# Altium footprint library LimeMicroAltiumLib.PcbLib: 876 footprints (part 22 of 57)
Each footprint in its own frame and in the unit in brackets; x right, y up, seen from the top. Pads: shape width x height; smd on the part's side, far side on the other; paste and mask are expansions set on the pad; w line width, h text height; cw(c..) or ccw(c..) is an arc to the next point about the centre after c.
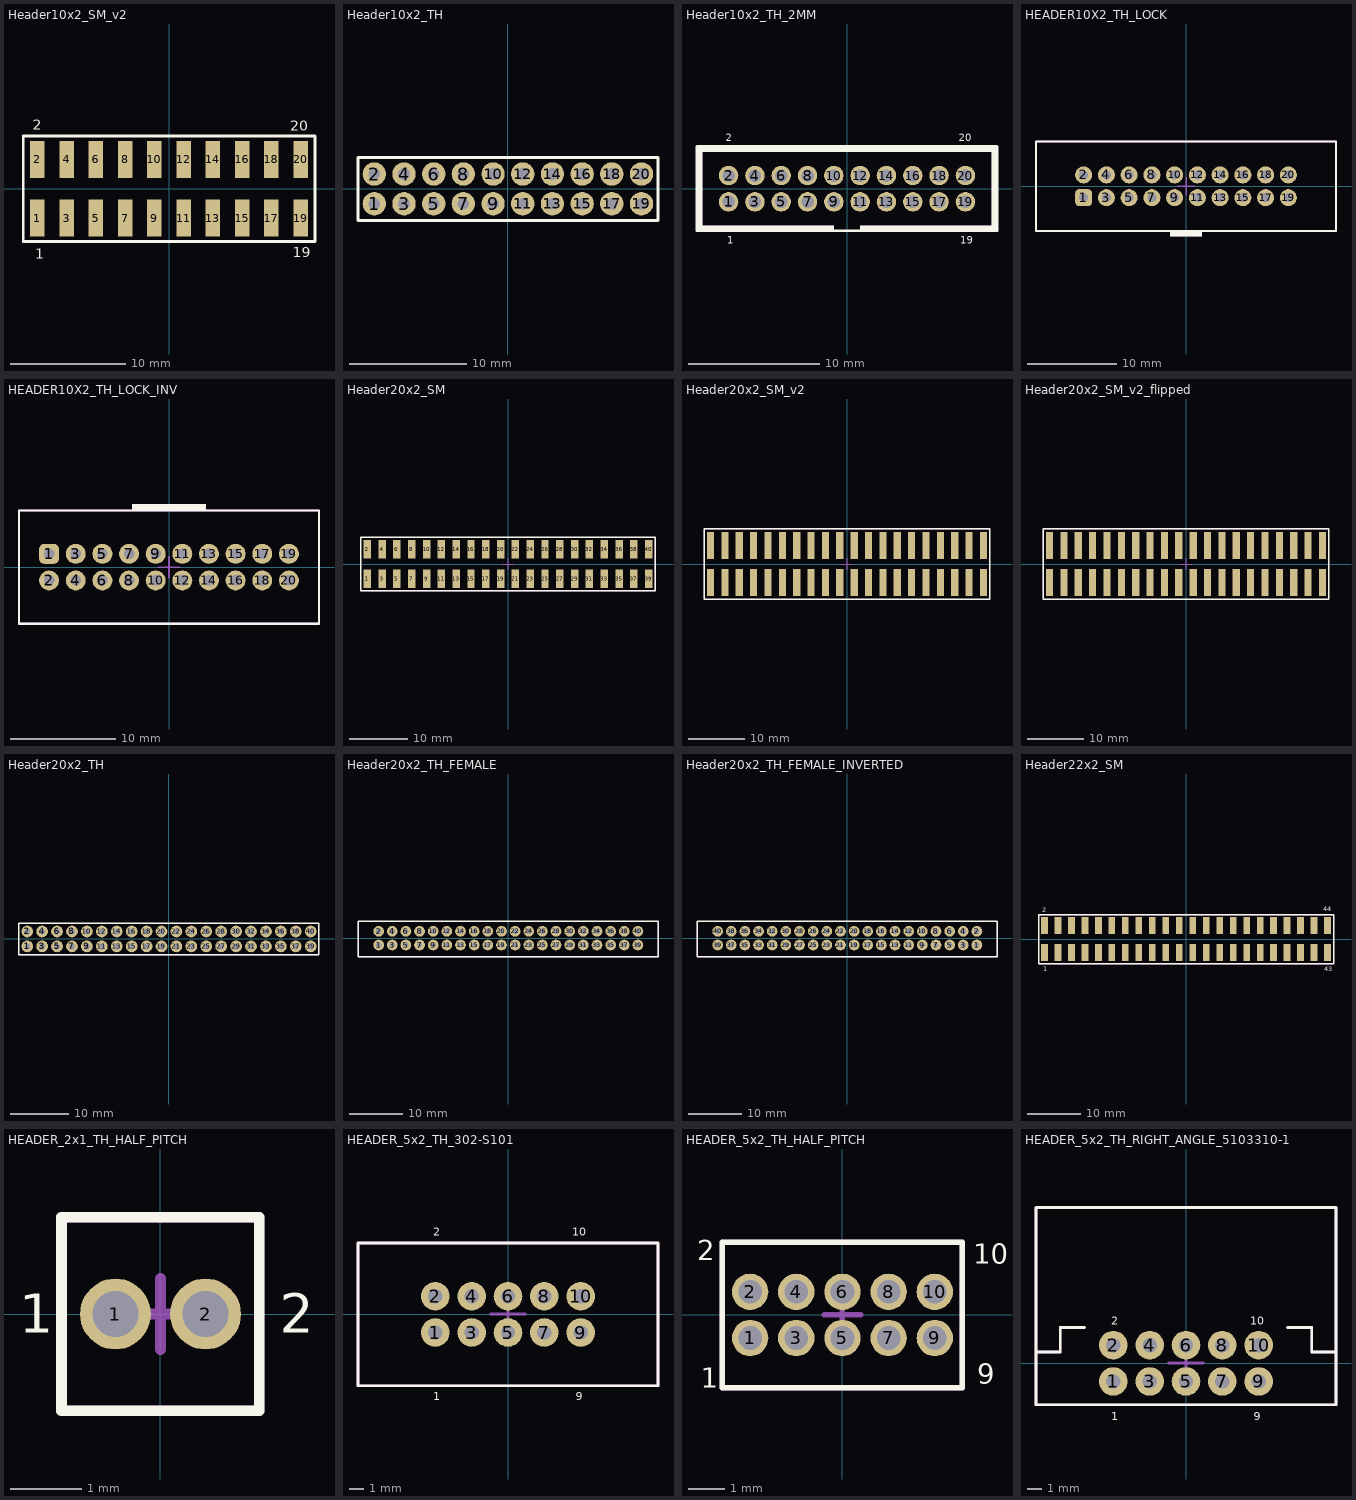
[diagram p21: the footprints below, top view; thin cyan lines are the x and y axes]

## Header10x2_SM_v2 [mm]
pads (20):
  rect 1.27x3.2 smd: 1(-11.443,-2.55) 2(-11.443,2.55) 3(-8.9,-2.55) 4(-8.9,2.55) 5(-6.357,-2.55) 6(-6.357,2.55) 7(-3.814,-2.55) 8(-3.814,2.55) 9(-1.271,-2.55) 10(-1.271,2.55) 11(1.271,-2.55) 12(1.271,2.55) 13(3.814,-2.55) 14(3.814,2.55) 15(6.357,-2.55) 16(6.357,2.55) 17(8.9,-2.55) 18(8.9,2.55) 19(11.443,-2.55) 20(11.443,2.55)
Top Overlay:
  lines w0.254: -12.675,-4.6 12.707,-4.6 12.707,4.6 -12.675,4.6 -12.675,-4.6
  text "1" at -11.643,-6.075 h0.9
  text "2" at -11.843,5.125 h0.9
  text "20" at 10.525,5.05 h0.9
  text "19" at 10.75,-5.975 h0.9
Mechanical 15:
  lines w0.15: -12.675,-4.6 -12.675,4.6 12.707,4.6 12.707,-4.6 -12.675,-4.6
  text ".Designator" at -0.175,0 h0.55
3D body "pin_header_a-sl254-dg-g20mp1.stp": height 9.7, standoff -0.04, extent -12.7,-3.75 12.7,3.75

## Header10x2_TH [mm] "JTAG"
pads (20):
  round 2 hole 1: 1(-11.443,-1.271) 2(-11.443,1.271) 3(-8.9,-1.271) 4(-8.9,1.271) 5(-6.357,-1.271) 6(-6.357,1.271) 7(-3.814,-1.271) 8(-3.814,1.271) 9(-1.271,-1.271) 10(-1.271,1.271) 11(1.271,-1.271) 12(1.271,1.271) 13(3.814,-1.271) 14(3.814,1.271) 15(6.357,-1.271) 16(6.357,1.271) 17(8.9,-1.271) 18(8.9,1.271) 19(11.443,-1.271) 20(11.443,1.271)
Top Overlay:
  lines w0.254: -12.843,-2.7 -12.843,2.675 12.857,2.675 12.857,-2.7 -12.843,-2.7
Mechanical 15:
  lines w0.15: -12.843,-2.7 12.857,-2.7 12.857,2.675 -12.843,2.675 -12.843,-2.7
  text ".Designator" at -0.543,-0.021 h0.55
3D body "65775.stp": height 8.54, standoff -3, extent 10.173,0.002 12.713,2.542
3D body "65775.stp": height 8.54, standoff -3, extent 10.173,-2.541 12.713,-0.001
3D body "65775.stp": height 8.54, standoff -3, extent 2.544,0.002 5.084,2.542
3D body "65775.stp": height 8.54, standoff -3, extent 2.544,-2.541 5.084,-0.001
3D body "65775.stp": height 8.54, standoff -3, extent 5.087,-2.541 7.627,-0.001
3D body "65775.stp": height 8.54, standoff -3, extent 5.087,0.002 7.627,2.542
3D body "65775.stp": height 8.54, standoff -3, extent 7.63,-2.541 10.17,-0.001
3D body "65775.stp": height 8.54, standoff -3, extent 7.63,0.002 10.17,2.542
3D body "65775.stp": height 8.54, standoff -3, extent -5.084,0.002 -2.544,2.542
3D body "65775.stp": height 8.54, standoff -3, extent -5.084,-2.541 -2.544,-0.001
3D body "65775.stp": height 8.54, standoff -3, extent -2.541,-2.541 -0.001,-0.001
3D body "65775.stp": height 8.54, standoff -3, extent -2.541,0.002 -0.001,2.542
3D body "65775.stp": height 8.54, standoff -3, extent 0.001,-2.541 2.541,-0.001
3D body "65775.stp": height 8.54, standoff -3, extent 0.001,0.002 2.541,2.542
3D body "65775.stp": height 8.54, standoff -3, extent -7.627,0.002 -5.087,2.542
3D body "65775.stp": height 8.54, standoff -3, extent -7.627,-2.541 -5.087,-0.001
3D body "65775.stp": height 8.54, standoff -3, extent -10.17,0.002 -7.63,2.542
3D body "65775.stp": height 8.54, standoff -3, extent -10.17,-2.541 -7.63,-0.001
3D body "65775.stp": height 8.54, standoff -3, extent -12.713,-2.541 -10.173,-0.001
3D body "65775.stp": height 8.54, standoff -3, extent -12.713,0.002 -10.173,2.542

## Header10x2_TH_2MM [mm]
pads (20):
  round 1.478 hole 0.95: 1(-9,-1) 2(-9,1) 3(-7,-1) 4(-7,1) 5(-5,-1) 6(-5,1) 7(-3,-1) 8(-3,1) 9(-1,-1) 10(-1,1) 11(1,-1) 12(1,1) 13(3,-1) 14(3,1) 15(5,-1) 16(5,1) 17(7,-1) 18(7,1) 19(9,-1) 20(9,1)
Top Overlay:
  region: -11.4,-3.2 -11,-3.2 -11,3.2 -11.4,3.2
  region: -1,-3.2 -1,-2.8 -11.4,-2.8 -11.4,-3.2
  region: 1,-3.2 1,-2.8 11.4,-2.8 11.4,-3.2
  region: 11.4,-3.2 11,-3.2 11,3.2 11.4,3.2
  region: -11.4,3.2 -11.4,2.8 11.4,2.8 11.4,3.2
  lines w0.2: -11.4,-3.2 -11.4,3.2 11.4,3.2 11.4,-3.2 -11.4,-3.2
  text "19" at 8.6,-4.2 h0.55
  text "20" at 8.5,3.6 h0.55
  text "2" at -9.2,3.6 h0.55
  text "1" at -9.1,-4.2 h0.55
Mechanical 15:
  region: -1,-3.2 -1,-2.8 -11.4,-2.8 -11.4,-3.2
  region: 1,-3.2 1,-2.8 11.4,-2.8 11.4,-3.2
  region: 11.4,-3.2 11,-3.2 11,3.2 11.4,3.2
  region: -11.4,-3.2 -11,-3.2 -11,3.2 -11.4,3.2
  region: -11.4,3.2 -11.4,2.8 11.4,2.8 11.4,3.2
  lines w0.15: -11.4,-3.2 -11.4,3.2 11.4,3.2 11.4,-3.2 -11.4,-3.2
  text "19" at 8.6,-1.3 h0.55
  text "20" at 8.6,0.8 h0.55
  text "2" at -9.1,0.8 h0.55
  text "1" at -9.1,-1.3 h0.55
  text ".Designator" at -0.543,-0.021 h0.55
3D body "878315920.stp": height 6.4, standoff -2.5, extent -11.325,-3.15 11.325,3.15

## HEADER10X2_TH_LOCK [mm]
pads (20):
  rrect50% 1.9x1.9 hole 1 mask+0.05: 1(-11.43,-1.27)
  round 1.9 hole 1 mask+0.05: 2(-11.43,1.27) 3(-8.89,-1.27) 4(-8.89,1.27) 5(-6.35,-1.27) 6(-6.35,1.27) 7(-3.81,-1.27) 8(-3.81,1.27) 9(-1.27,-1.27) 10(-1.27,1.27) 11(1.27,-1.27) 12(1.27,1.27) 13(3.81,-1.27) 14(3.81,1.27) 15(6.35,-1.27) 16(6.35,1.27) 17(8.89,-1.27) 18(8.89,1.27) 19(11.43,-1.27) 20(11.43,1.27)
Top Overlay:
  region: 1.75,-5 -1.75,-5 -1.75,-5.6 1.75,-5.6
  lines w0.2: -16.75,-5 16.75,-5 16.75,5 -16.75,5 -16.75,-5
Mechanical 15:
  region: 1.75,-5 -1.75,-5 -1.75,-5.6 1.75,-5.6
  lines w0.15: -1,0 0,0 ; 0,-1 0,0 ; 0,1 0,0 ; 1,0 0,0
  lines w0.2: -16.75,-5 -16.75,5 16.75,5 16.75,-5 -16.75,-5
  text ".Designator" at 0,0 h0.55
  text "1" at -11.5,-1.5 h0.55
  text "2" at -11.5,1 h0.55
3D body "User Library-302-S201.step": height 9, standoff -3.1, extent -16.51,-4.5 16.51,4.6

## HEADER10X2_TH_LOCK_INV [mm]
pads (20):
  rrect50% 1.9x1.9 hole 1 mask+0.05: 1(-11.43,1.27)
  round 1.9 hole 1 mask+0.05: 2(-11.43,-1.27) 3(-8.89,1.27) 4(-8.89,-1.27) 5(-6.35,1.27) 6(-6.35,-1.27) 7(-3.81,1.27) 8(-3.81,-1.27) 9(-1.27,1.27) 10(-1.27,-1.27) 11(1.27,1.27) 12(1.27,-1.27) 13(3.81,1.27) 14(3.81,-1.27) 15(6.35,1.27) 16(6.35,-1.27) 17(8.89,1.27) 18(8.89,-1.27) 19(11.43,1.27) 20(11.43,-1.27)
Top Overlay:
  region: 0,5.4 -3.5,5.4 -3.5,6 0,6
  region: 0,5.4 3.5,5.4 3.5,6 0,6
  lines w0.2: -14.3,-5.4 -14.3,5.4 14.3,5.4 14.3,-5.4 -14.3,-5.4
Mechanical 15:
  region: 0,5.4 -3.5,5.4 -3.5,6 0,6
  region: 0,5.4 3.5,5.4 3.5,6 0,6
  lines w0.15: -1,0 0,0 ; 0,-1 0,0 ; 0,1 0,0 ; 1,0 0,0
  lines w0.2: -14.3,-5.4 14.3,-5.4 14.3,5.4 -14.3,5.4 -14.3,-5.4
  text ".Designator" at 0,0 h0.55
3D body "Conn_Molex_90130-1220_eec.STEP": height 0.25, standoff 0, extent -14.07,-5.125 14.07,5.125

## Header20x2_SM [mm]
pads (40):
  rect 1.27x3.2 smd: 1(-24.157,-2.55) 2(-24.157,2.55) 3(-21.614,-2.55) 4(-21.614,2.55) 5(-19.071,-2.55) 6(-19.071,2.55) 7(-16.529,-2.55) 8(-16.529,2.55) 9(-13.986,-2.55) 10(-13.986,2.55) 11(-11.443,-2.55) 12(-11.443,2.55) 13(-8.9,-2.55) 14(-8.9,2.55) 15(-6.357,-2.55) 16(-6.357,2.55) 17(-3.814,-2.55) 18(-3.814,2.55) 19(-1.271,-2.55) 20(-1.271,2.55) 21(1.271,-2.55) 22(1.271,2.55) 23(3.814,-2.55) 24(3.814,2.55) 25(6.357,-2.55) 26(6.357,2.55) 27(8.9,-2.55) 28(8.9,2.55) 29(11.443,-2.55) 30(11.443,2.55) 31(13.986,-2.55) 32(13.986,2.55) 33(16.529,-2.55) 34(16.529,2.55) 35(19.071,-2.55) 36(19.071,2.55) 37(21.614,-2.55) 38(21.614,2.55) 39(24.157,-2.55) 40(24.157,2.55)
Top Overlay:
  lines w0.254: -25.257,-4.6 25.257,-4.6 25.257,4.6 -25.257,4.6 -25.257,-4.6
Mechanical 15:
  lines w0.1: -1,0 0,0 ; 0,-1 0,0 ; 0,1 0,0 ; 1,0 0,0
  lines w0.15: -25.257,-4.6 -25.257,4.6 25.257,4.6 25.257,-4.6 -25.257,-4.6
  text ".Designator" at 0,0 h0.55
3D body "pin_header_a-sl254-dg-g08mp1.stp": height 9.7, standoff -0.04, extent -25.437,-3.95 -15.277,3.55
3D body "pin_header_a-sl254-dg-g08mp1.stp": height 9.7, standoff -0.04, extent -15.277,-3.95 -5.117,3.55
3D body "pin_header_a-sl254-dg-g08mp1.stp": height 9.7, standoff -0.04, extent -5.106,-3.95 5.054,3.55
3D body "pin_header_a-sl254-dg-g08mp1.stp": height 9.7, standoff -0.04, extent 5.066,-3.95 15.226,3.55
3D body "pin_header_a-sl254-dg-g08mp1.stp": height 9.7, standoff -0.04, extent 15.237,-3.95 25.397,3.55

## Header20x2_SM_v2 [mm]
pads (40):
  rect 1.27x4.8 smd: 1(-24.157,-3.25) 2(-24.157,3.25) 3(-21.614,-3.25) 4(-21.614,3.25) 5(-19.071,-3.25) 6(-19.071,3.25) 7(-16.529,-3.25) 8(-16.529,3.25) 9(-13.986,-3.25) 10(-13.986,3.25) 11(-11.443,-3.25) 12(-11.443,3.25) 13(-8.9,-3.25) 14(-8.9,3.25) 15(-6.357,-3.25) 16(-6.357,3.25) 17(-3.814,-3.25) 18(-3.814,3.25) 19(-1.271,-3.25) 20(-1.271,3.25) 21(1.271,-3.25) 22(1.271,3.25) 23(3.814,-3.25) 24(3.814,3.25) 25(6.357,-3.25) 26(6.357,3.25) 27(8.9,-3.25) 28(8.9,3.25) 29(11.443,-3.25) 30(11.443,3.25) 31(13.986,-3.25) 32(13.986,3.25) 33(16.529,-3.25) 34(16.529,3.25) 35(19.071,-3.25) 36(19.071,3.25) 37(21.614,-3.25) 38(21.614,3.25) 39(24.157,-3.25) 40(24.157,3.25)
Top Overlay:
  lines w0.254: -25.257,-6.25 -25.257,6.25 25.257,6.25 25.257,-6.25 -25.257,-6.25
Mechanical 15:
  lines w0.1: -1,0 0,0 ; 0,-1 0,0 ; 0,1 0,0 ; 1,0 0,0
  lines w0.15: -25.257,-6.25 25.257,-6.25 25.257,6.25 -25.257,6.25 -25.257,-6.25
  text ".Designator" at 0,0 h0.55

## Header20x2_SM_v2_flipped [mm]
pads (40):
  rect 1.27x4.8 smd: 1(24.157,3.25) 2(24.157,-3.25) 3(21.614,3.25) 4(21.614,-3.25) 5(19.071,3.25) 6(19.071,-3.25) 7(16.529,3.25) 8(16.529,-3.25) 9(13.986,3.25) 10(13.986,-3.25) 11(11.443,3.25) 12(11.443,-3.25) 13(8.9,3.25) 14(8.9,-3.25) 15(6.357,3.25) 16(6.357,-3.25) 17(3.814,3.25) 18(3.814,-3.25) 19(1.271,3.25) 20(1.271,-3.25) 21(-1.271,3.25) 22(-1.271,-3.25) 23(-3.814,3.25) 24(-3.814,-3.25) 25(-6.357,3.25) 26(-6.357,-3.25) 27(-8.9,3.25) 28(-8.9,-3.25) 29(-11.443,3.25) 30(-11.443,-3.25) 31(-13.986,3.25) 32(-13.986,-3.25) 33(-16.529,3.25) 34(-16.529,-3.25) 35(-19.071,3.25) 36(-19.071,-3.25) 37(-21.614,3.25) 38(-21.614,-3.25) 39(-24.157,3.25) 40(-24.157,-3.25)
Top Overlay:
  lines w0.254: -25.257,-6.25 25.257,-6.25 25.257,6.25 -25.257,6.25 -25.257,-6.25
Mechanical 15:
  lines w0.1: -1,0 0,0 ; 0,-1 0,0 ; 0,1 0,0 ; 1,0 0,0
  lines w0.15: -25.257,-6.25 -25.257,6.25 25.257,6.25 25.257,-6.25 -25.257,-6.25
  text ".Designator" at 0,0 h0.55

## Header20x2_TH [mm] "JTAG"
pads (40):
  round 2 hole 1: 1(-24.157,-1.271) 2(-24.157,1.271) 3(-21.614,-1.271) 4(-21.614,1.271) 5(-19.071,-1.271) 6(-19.071,1.271) 7(-16.529,-1.271) 8(-16.529,1.271) 9(-13.986,-1.271) 10(-13.986,1.271) 11(-11.443,-1.271) 12(-11.443,1.271) 13(-8.9,-1.271) 14(-8.9,1.271) 15(-6.357,-1.271) 16(-6.357,1.271) 17(-3.814,-1.271) 18(-3.814,1.271) 19(-1.271,-1.271) 20(-1.271,1.271) 21(1.271,-1.271) 22(1.271,1.271) 23(3.814,-1.271) 24(3.814,1.271) 25(6.357,-1.271) 26(6.357,1.271) 27(8.9,-1.271) 28(8.9,1.271) 29(11.443,-1.271) 30(11.443,1.271) 31(13.986,-1.271) 32(13.986,1.271) 33(16.529,-1.271) 34(16.529,1.271) 35(19.071,-1.271) 36(19.071,1.271) 37(21.614,-1.271) 38(21.614,1.271) 39(24.157,-1.271) 40(24.157,1.271)
Top Overlay:
  lines w0.254: -25.557,-2.7 -25.557,2.675 25.571,2.675 25.571,-2.7 -25.557,-2.7
Mechanical 15:
  lines w0.15: -25.557,-2.7 25.571,-2.7 25.571,2.675 -25.557,2.675 -25.557,-2.7
  text ".Designator" at 0,0 h0.55
3D body "65775.stp": height 8.54, standoff -3, extent 12.716,0.002 15.256,2.542
3D body "65775.stp": height 8.54, standoff -3, extent 12.716,-2.541 15.256,-0.001
3D body "65775.stp": height 8.54, standoff -3, extent 20.344,0.002 22.884,2.542
3D body "65775.stp": height 8.54, standoff -3, extent 20.344,-2.541 22.884,-0.001
3D body "65775.stp": height 8.54, standoff -3, extent 17.802,0.002 20.342,2.542
3D body "65775.stp": height 8.54, standoff -3, extent 17.802,-2.541 20.342,-0.001
3D body "65775.stp": height 8.54, standoff -3, extent 15.259,-2.541 17.799,-0.001
3D body "65775.stp": height 8.54, standoff -3, extent 15.259,0.002 17.799,2.542
3D body "65775.stp": height 8.54, standoff -3, extent 22.887,-2.541 25.427,-0.001
3D body "65775.stp": height 8.54, standoff -3, extent 22.887,0.002 25.427,2.542
3D body "65775.stp": height 8.54, standoff -3, extent 0.002,0.002 2.542,2.542
3D body "65775.stp": height 8.54, standoff -3, extent 0.002,-2.541 2.542,-0.001
3D body "65775.stp": height 8.54, standoff -3, extent 7.63,0.002 10.17,2.542
3D body "65775.stp": height 8.54, standoff -3, extent 7.63,-2.541 10.17,-0.001
3D body "65775.stp": height 8.54, standoff -3, extent 5.087,0.002 7.627,2.542
3D body "65775.stp": height 8.54, standoff -3, extent 5.087,-2.541 7.627,-0.001
3D body "65775.stp": height 8.54, standoff -3, extent 2.544,-2.541 5.084,-0.001
3D body "65775.stp": height 8.54, standoff -3, extent 2.544,0.002 5.084,2.542
3D body "65775.stp": height 8.54, standoff -3, extent 10.173,-2.541 12.713,-0.001
3D body "65775.stp": height 8.54, standoff -3, extent 10.173,0.002 12.713,2.542
3D body "65775.stp": height 8.54, standoff -3, extent -2.541,0.002 -0.001,2.542
3D body "65775.stp": height 8.54, standoff -3, extent -2.541,-2.541 -0.001,-0.001
3D body "65775.stp": height 8.54, standoff -3, extent -10.17,0.002 -7.63,2.542
3D body "65775.stp": height 8.54, standoff -3, extent -10.17,-2.541 -7.63,-0.001
3D body "65775.stp": height 8.54, standoff -3, extent -7.627,-2.541 -5.087,-0.001
3D body "65775.stp": height 8.54, standoff -3, extent -7.627,0.002 -5.087,2.542
3D body "65775.stp": height 8.54, standoff -3, extent -5.084,-2.541 -2.544,-0.001
3D body "65775.stp": height 8.54, standoff -3, extent -5.084,0.002 -2.544,2.542
3D body "65775.stp": height 8.54, standoff -3, extent -17.799,0.002 -15.259,2.542
3D body "65775.stp": height 8.54, standoff -3, extent -17.799,-2.541 -15.259,-0.001
3D body "65775.stp": height 8.54, standoff -3, extent -15.256,-2.541 -12.716,-0.001
3D body "65775.stp": height 8.54, standoff -3, extent -15.256,0.002 -12.716,2.542
3D body "65775.stp": height 8.54, standoff -3, extent -12.713,-2.541 -10.173,-0.001
3D body "65775.stp": height 8.54, standoff -3, extent -12.713,0.002 -10.173,2.542
3D body "65775.stp": height 8.54, standoff -3, extent -20.341,0.002 -17.801,2.542
3D body "65775.stp": height 8.54, standoff -3, extent -20.341,-2.541 -17.801,-0.001
3D body "65775.stp": height 8.54, standoff -3, extent -22.884,0.002 -20.344,2.542
3D body "65775.stp": height 8.54, standoff -3, extent -22.884,-2.541 -20.344,-0.001
3D body "65775.stp": height 8.54, standoff -3, extent -25.427,-2.541 -22.887,-0.001
3D body "65775.stp": height 8.54, standoff -3, extent -25.427,0.002 -22.887,2.542

## Header20x2_TH_FEMALE [mm] "JTAG"
pads (40):
  round 2 hole 1: 1(-24.157,-1.271) 2(-24.157,1.271) 3(-21.614,-1.271) 4(-21.614,1.271) 5(-19.071,-1.271) 6(-19.071,1.271) 7(-16.529,-1.271) 8(-16.529,1.271) 9(-13.986,-1.271) 10(-13.986,1.271) 11(-11.443,-1.271) 12(-11.443,1.271) 13(-8.9,-1.271) 14(-8.9,1.271) 15(-6.357,-1.271) 16(-6.357,1.271) 17(-3.814,-1.271) 18(-3.814,1.271) 19(-1.271,-1.271) 20(-1.271,1.271) 21(1.271,-1.271) 22(1.271,1.271) 23(3.814,-1.271) 24(3.814,1.271) 25(6.357,-1.271) 26(6.357,1.271) 27(8.9,-1.271) 28(8.9,1.271) 29(11.443,-1.271) 30(11.443,1.271) 31(13.986,-1.271) 32(13.986,1.271) 33(16.529,-1.271) 34(16.529,1.271) 35(19.071,-1.271) 36(19.071,1.271) 37(21.614,-1.271) 38(21.614,1.271) 39(24.157,-1.271) 40(24.157,1.271)
Top Overlay:
  lines w0.254: -28,-3.5 -28,3.2 27.9,3.2 27.9,-3.5 -28,-3.5
Mechanical 15:
  lines w0.15: -28,-3.5 27.9,-3.5 27.9,3.2 -28,3.2 -28,-3.5
  text ".Designator" at 0,0 h0.55
3D body "SFH11-xxPC-D20-ST-BK.STEP": height 8.54, standoff -3.16, extent -27.83,-4.1 27.89,3

## Header20x2_TH_FEMALE_INVERTED [mm] "JTAG"
pads (40):
  round 2 hole 1: 1(24.157,-1.271) 2(24.157,1.271) 3(21.614,-1.271) 4(21.614,1.271) 5(19.071,-1.271) 6(19.071,1.271) 7(16.529,-1.271) 8(16.529,1.271) 9(13.986,-1.271) 10(13.986,1.271) 11(11.443,-1.271) 12(11.443,1.271) 13(8.9,-1.271) 14(8.9,1.271) 15(6.357,-1.271) 16(6.357,1.271) 17(3.814,-1.271) 18(3.814,1.271) 19(1.271,-1.271) 20(1.271,1.271) 21(-1.271,-1.271) 22(-1.271,1.271) 23(-3.814,-1.271) 24(-3.814,1.271) 25(-6.357,-1.271) 26(-6.357,1.271) 27(-8.9,-1.271) 28(-8.9,1.271) 29(-11.443,-1.271) 30(-11.443,1.271) 31(-13.986,-1.271) 32(-13.986,1.271) 33(-16.529,-1.271) 34(-16.529,1.271) 35(-19.071,-1.271) 36(-19.071,1.271) 37(-21.614,-1.271) 38(-21.614,1.271) 39(-24.157,-1.271) 40(-24.157,1.271)
Top Overlay:
  lines w0.254: -28,-3.5 27.9,-3.5 27.9,3.2 -28,3.2 -28,-3.5
Mechanical 15:
  lines w0.15: -28,-3.5 -28,3.2 27.9,3.2 27.9,-3.5 -28,-3.5
  text ".Designator" at 0,0 h0.55
3D body "SFH11-xxPC-D20-ST-BK.STEP": height 8.54, standoff -3.16, extent -27.83,-4.1 27.89,3

## Header22x2_SM [mm]
pads (44):
  rect 1.27x3.2 smd: 1(-26.7,-2.55) 2(-26.7,2.55) 3(-24.157,-2.55) 4(-24.157,2.55) 5(-21.614,-2.55) 6(-21.614,2.55) 7(-19.071,-2.55) 8(-19.071,2.55) 9(-16.529,-2.55) 10(-16.529,2.55) 11(-13.986,-2.55) 12(-13.986,2.55) 13(-11.443,-2.55) 14(-11.443,2.55) 15(-8.9,-2.55) 16(-8.9,2.55) 17(-6.357,-2.55) 18(-6.357,2.55) 19(-3.814,-2.55) 20(-3.814,2.55) 21(-1.271,-2.55) 22(-1.271,2.55) 23(1.271,-2.55) 24(1.271,2.55) 25(3.814,-2.55) 26(3.814,2.55) 27(6.357,-2.55) 28(6.357,2.55) 29(8.9,-2.55) 30(8.9,2.55) 31(11.443,-2.55) 32(11.443,2.55) 33(13.986,-2.55) 34(13.986,2.55) 35(16.529,-2.55) 36(16.529,2.55) 37(19.071,-2.55) 38(19.071,2.55) 39(21.614,-2.55) 40(21.614,2.55) 41(24.157,-2.55) 42(24.157,2.55) 43(26.7,-2.55) 44(26.7,2.55)
Top Overlay:
  lines w0.254: -27.8,-4.6 -27.8,4.6 27.854,4.6 27.854,-4.6 -27.8,-4.6
  text "43" at 26.125,-6.05 h0.9
  text "44" at 25.875,5.25 h0.9
  text "2" at -27.1,5.125 h0.9
  text "1" at -26.9,-6.075 h0.9
Mechanical 15:
  lines w0.15: -27.8,-4.6 27.854,-4.6 27.854,4.6 -27.8,4.6 -27.8,-4.6
  text ".Designator" at -1.296,0.075 h0.55
3D body "pin_header_a-sl254-dg-g20mp1.stp": height 9.7, standoff -0.04, extent 2.586,-3.75 27.986,3.75
3D body "pin_header_a-sl254-dg-g20mp1.stp": height 9.7, standoff -0.04, extent -2.5,-3.75 22.9,3.75
3D body "pin_header_a-sl254-dg-g20mp1.stp": height 9.7, standoff -0.04, extent -27.9,-3.75 -2.5,3.75

## HEADER_2x1_TH_HALF_PITCH [mm]
pads (2):
  round 1 hole 0.65 mask+0.05: 1(-0.635,0) 2(0.635,0)
Top Overlay:
  lines w0.15: -1.395,-1.365 -1.395,1.365 1.395,1.365 1.395,-1.365 -1.395,-1.365
  text "2" at 1.685,-0.265 h0.55
  text "1" at -1.995,-0.265 h0.55
Mechanical 15:
  lines w0.15: -0.5,0 0,0 ; 0,-0.5 0,0 ; 0,0.5 0,0 ; 0.5,0 0,0 ; -1.395,-1.365 1.395,-1.365 1.395,1.365 -1.395,1.365 -1.395,-1.365
  text ".Designator" at 0,0 h0.55
  text "1" at -0.72,-0.29 h0.55
3D body "User Library-PinHeader1_27_2.STEP": height 5, standoff -2.3, extent -1.27,-1.2 1.27,1.2

## HEADER_5x2_TH_302-S101 [mm]
pads (10):
  round 2 hole 1: 1(-5.086,-1.271) 2(-5.086,1.271) 3(-2.543,-1.271) 4(-2.543,1.271) 5(0,-1.271) 6(0,1.271) 7(2.543,-1.271) 8(2.543,1.271) 9(5.086,-1.271) 10(5.086,1.271)
Top Overlay:
  lines w0.2: -10.5,-5 -10.5,5 10.5,5 10.5,-5 -10.5,-5
  text "10" at 4.5,5.5 h0.55
  text "9" at 4.75,-6 h0.55
  text "2" at -5.25,5.5 h0.55
  text "1" at -5.25,-6 h0.55
Mechanical 15:
  lines w0.2: -1.229,0.021 0,0.021 ; 0,-1.207 0,0.021 ; 0,1.25 0,0.021 ; 1.229,0.021 0,0.021 ; -10.5,-5 10.5,-5 10.5,5 -10.5,5 -10.5,-5
  text "10" at 4.75,1.25 h0.55
  text ".Designator" at 0,0.021 h0.55
  text "9" at 5,-1.75 h0.55
  text "1" at -5.25,-1.75 h0.55
  text "2" at -5.25,1.25 h0.55
3D body "User Library-BH_10_V.step": height 9, standoff -3, extent -10.16,-4.579 10.16,4.521

## HEADER_5x2_TH_HALF_PITCH [mm]
pads (10):
  round 1 hole 0.65 mask+0.05: 1(-2.54,-0.635) 2(-2.54,0.635) 3(-1.27,-0.635) 4(-1.27,0.635) 5(0,-0.635) 6(0,0.635) 7(1.27,-0.635) 8(1.27,0.635) 9(2.54,-0.635) 10(2.54,0.635)
Top Overlay:
  lines w0.15: -3.3,-2 3.3,-2 3.3,2 -3.3,2 -3.3,-2
  text "10" at 3.6,1.4 h0.55
  text "9" at 3.7,-1.9 h0.55
  text "2" at -4,1.5 h0.55
  text "1" at -3.9,-2 h0.55
Mechanical 15:
  lines w0.15: -0.5,0 0,0 ; 0,-0.5 0,0 ; 0,0.5 0,0 ; 0.5,0 0,0 ; -3.3,-2 3.3,-2 3.3,2 -3.3,2 -3.3,-2
  text "10" at 2.1,0.575 h0.55
  text ".Designator" at 0,0 h0.55
  text "9" at 2.4,-0.95 h0.55
  text "1" at -2.625,-0.925 h0.55
  text "2" at -2.7,0.35 h0.55
3D body "User Library-PinHeader1_27_2.STEP": height 5, standoff -2.3, extent -3.175,-0.565 -0.635,1.835
3D body "User Library-PinHeader1_27_2.STEP": height 5, standoff -2.3, extent -3.175,-1.835 -0.635,0.565
3D body "User Library-PinHeader1_27_2.STEP": height 5, standoff -2.3, extent -1.905,-1.835 0.635,0.565
3D body "User Library-PinHeader1_27_2.STEP": height 5, standoff -2.3, extent -1.905,-0.565 0.635,1.835
3D body "User Library-PinHeader1_27_2.STEP": height 5, standoff -2.3, extent 0.635,-1.835 3.175,0.565
3D body "User Library-PinHeader1_27_2.STEP": height 5, standoff -2.3, extent 0.635,-0.565 3.175,1.835

## HEADER_5x2_TH_RIGHT_ANGLE_5103310-1 [mm]
pads (10):
  round 2 hole 1: 1(-5.086,-1.271) 2(-5.086,1.271) 3(-2.543,-1.271) 4(-2.543,1.271) 5(0,-1.271) 6(0,1.271) 7(2.543,-1.271) 8(2.543,1.271) 9(5.086,-1.271) 10(5.086,1.271)
Top Overlay:
  lines w0.2: -10.5,0.8 -8.8,0.8 -8.8,2.5 -7.1,2.5 ; 7.1,2.5 8.8,2.5 8.8,0.8 10.5,0.8 ; -10.5,-2.9 10.5,-2.9 10.5,10.9 -10.5,10.9 -10.5,-2.9
  text "1" at -5.25,-4 h0.55
  text "2" at -5.25,2.7 h0.55
  text "9" at 4.75,-4 h0.55
  text "10" at 4.5,2.7 h0.55
Mechanical 15:
  lines w0.2: -10.5,0.8 -8.8,0.8 -8.8,2.5 -7.1,2.5 ; -1.229,0.021 0,0.021 ; 0,-1.207 0,0.021 ; 0,1.25 0,0.021 ; 1.229,0.021 0,0.021 ; 7.1,2.5 8.8,2.5 8.8,0.8 10.5,0.8 ; -10.5,-2.9 -10.5,10.9 10.5,10.9 10.5,-2.9 -10.5,-2.9
  text "Board edge" at -2.7,10 h0.55
  text "2" at -5.25,1.25 h0.55
  text "1" at -5.25,-1.75 h0.55
  text "9" at 5,-1.75 h0.55
  text ".Designator" at 0,0.021 h0.55
  text "10" at 4.75,1.25 h0.55
3D body "5103310-1.STEP": height 9.07, standoff -3.5, extent -10.16,-1.571 10.16,10.881